# Altium footprint library Capacitors.PcbLib: 95 footprints (part 5 of 6)
Each footprint in its own frame and in the unit in brackets; x right, y up, seen from the top. Pads: shape width x height; smd on the part's side, far side on the other; paste and mask are expansions set on the pad; w line width, h text height; cw(c..) or ccw(c..) is an arc to the next point about the centre after c.
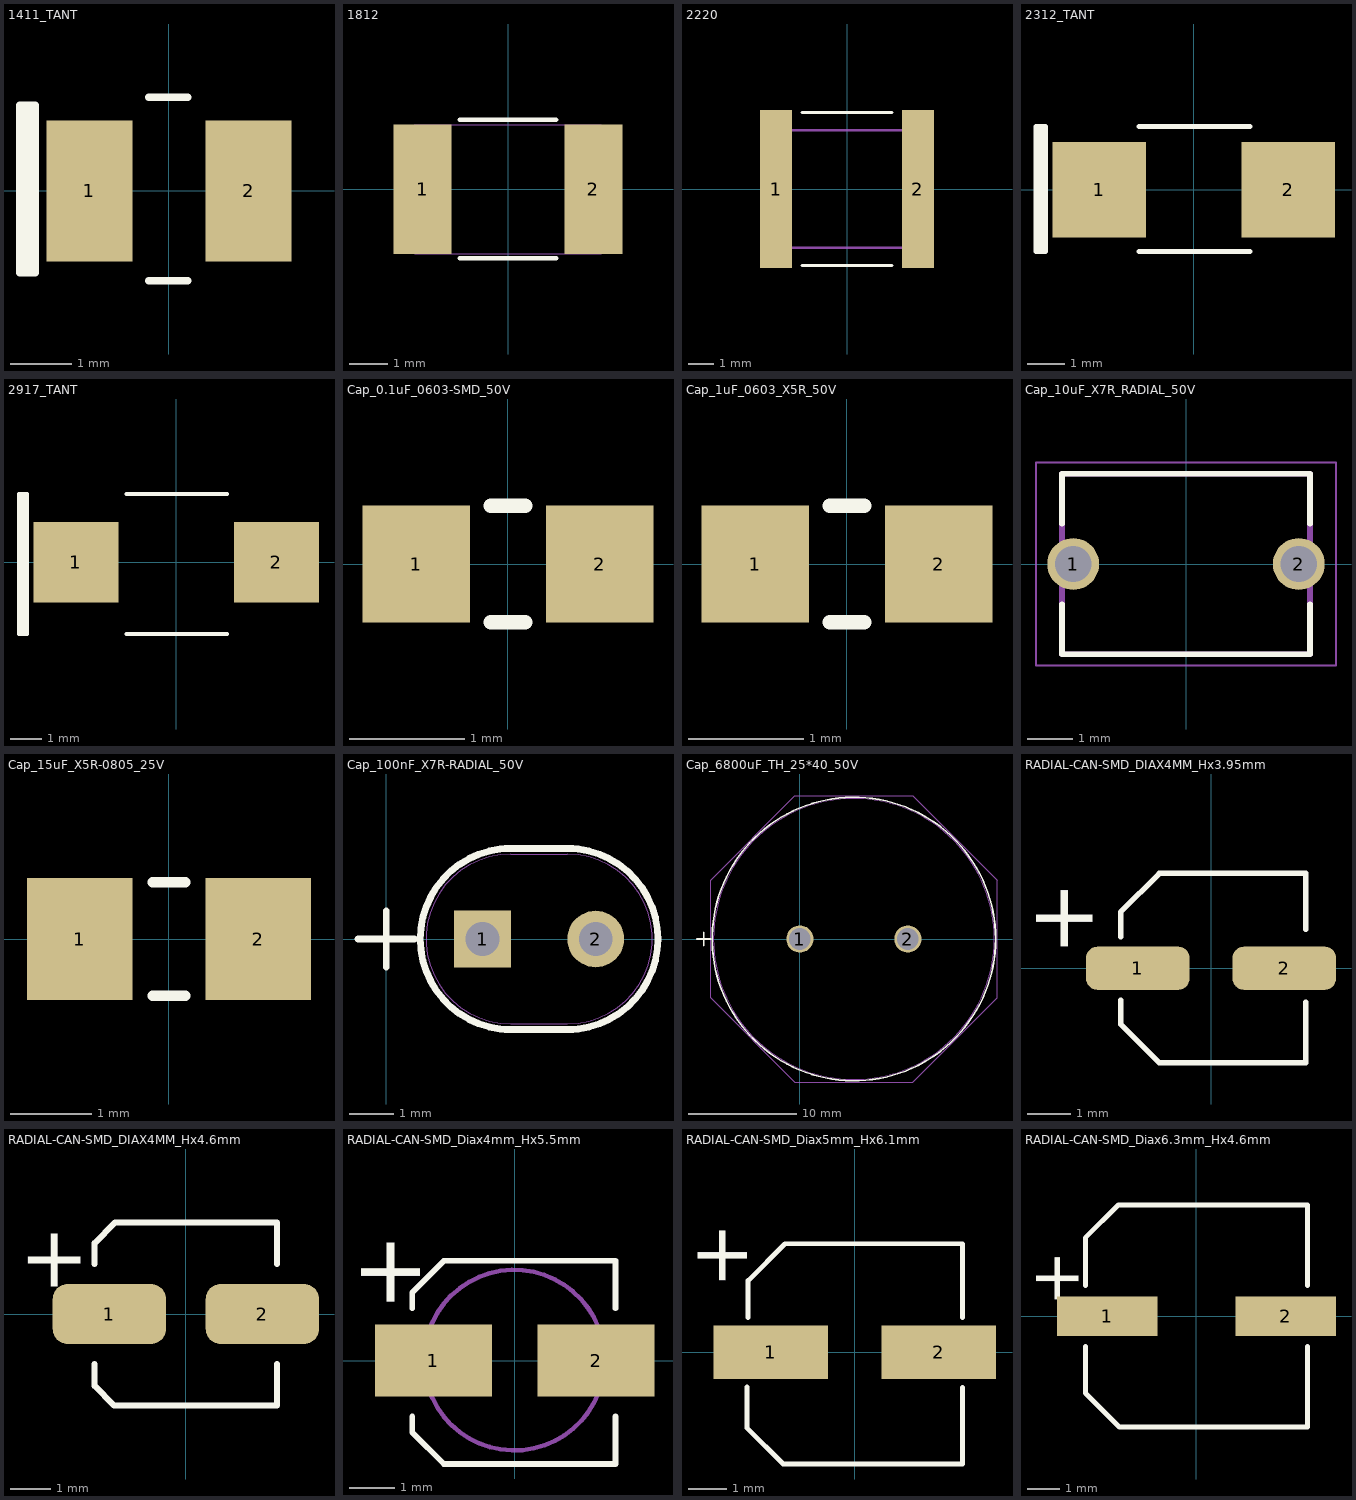
[diagram p4: the footprints below, top view; thin cyan lines are the x and y axes]

## 1411_TANT [mm] "20220701 / E.Naranjo"
pads (2):
  rect 1.405x2.3 smd: 1(-1.3,0) 2(1.3,0)
Top Overlay:
  lines w0.127: -2.31,-1.339 -2.31,1.393 ; -0.332,-1.469 0.303,-1.469 ; -0.332,1.529 0.303,1.529 ; -2.437,-1.339 -2.183,-1.339 -2.183,1.393 -2.437,1.393 -2.437,-1.339
3D body "CTSM_TCM2NK_3528_L3.7W3H2.1T0.13S0.8F2.3A1.9B0.55E2.2G1.8P0.5R1X0.2.step": height 2.12, standoff 0.01, extent -1.836,-1.471 1.864,1.529

## 1812 [mm] "/20220517/F-A.Ospina"
pads (2):
  rect 1.52x3.4 smd paste+0: 1(-2.248,0) 2(2.248,0)
Top Overlay:
  lines w0.127: -1.272,1.829 1.267,1.829 ; -1.27,-1.817 1.27,-1.817
Mechanical 13:
  lines w0.025: -2.451,-1.702 -2.451,1.702 ; -2.451,-1.702 -1.689,-1.702 -1.689,1.702 -2.451,1.702 ; -2.451,-1.702 -2.451,1.702 ; -2.451,-1.702 2.451,-1.702 ; -2.451,1.702 2.451,1.702 ; 2.451,-1.702 1.689,-1.702 1.689,1.702 2.451,1.702 ; 2.451,-1.702 2.451,1.702 ; 2.451,-1.702 2.451,1.702
3D body "CAP_CC1812_YAG.step": height 3.4, standoff 0, extent -2.451,-1.702 2.451,1.702

## 2220 [mm] "5750 Metric / 20190221 / C-A.Serna.A"
height 2.5
pads (2):
  rect 1.25x6.2 smd: 1(-2.775,0) 2(2.775,0)
Top Overlay:
  lines w0.127: -1.75,-3 1.75,-3 ; -1.75,3 1.75,3
Mechanical 1:
  lines w0.1: -3.05,-2.3 3.05,-2.3 3.05,2.3 -3.05,2.3 -3.05,-2.3
3D body: height 2.5, standoff 0, extent -3.05,-2.3 -2.7,2.3
3D body: height 2.5, standoff 0, extent -2.7,-2.3 2.7,2.3
3D body: height 2.5, standoff 0, extent 2.7,-2.3 3.05,2.3

## 2312_TANT [mm] "6032 Metric / 20230427 / J.Jaramillo"
pads (2):
  rect 2.5x2.55 smd: 1(-2.525,0) 2(2.525,0)
Top Overlay:
  lines w0.127: -4.089,-1.655 -4.089,1.69 ; -1.465,-1.655 1.505,-1.655 ; -1.465,1.69 1.505,1.69 ; -4.216,-1.655 -4.216,1.69 -3.962,1.69 -3.962,-1.655 -4.216,-1.655
3D body "2312.step": height 2.7, standoff 0, extent -3.085,-1.655 3.015,1.695

## 2917_TANT [mm] "7343 Metric / 20230427/ J.Jaramillo"
pads (2):
  rect 2.7x2.55 smd: 1(-3.175,0) 2(3.175,0)
Top Overlay:
  lines w0.127: -4.851,-2.285 -4.851,2.165 ; -1.58,-2.285 1.61,-2.285 ; -1.58,2.165 1.61,2.165 ; -4.978,-2.285 -4.978,2.165 -4.724,2.165 -4.724,-2.285 -4.978,-2.285
3D body "2917-3d.step": height 4.2, standoff 0, extent -3.685,-2.285 3.715,2.165

## Cap_0.1uF_0603-SMD_50V [mil] "/20261021/"
pads (2):
  rect 37x40 smd: 1(-31.5,0.01) 2(31.5,0.01)
Top Overlay:
  lines w5: -5.9,-19.99 5.91,-19.99 ; -5.9,19.99 5.91,19.99
3D body "C0603.step": height 11.89, standoff 0, extent -31.49,-15.74 31.5,15.76

## Cap_1uF_0603_X5R_50V [mil] "/20261021/"
pads (2):
  rect 37x40 smd: 1(-31.5,0.01) 2(31.5,0.01)
Top Overlay:
  lines w5: -5.9,-19.99 5.91,-19.99 ; -5.9,19.99 5.91,19.99
3D body "C0603.step": height 11.89, standoff 0, extent -31.49,-15.74 31.5,15.76

## Cap_10uF_X7R_RADIAL_50V [mm] "/20261022/"
pads (2):
  round 1.15 hole 0.8: 1(-2.5,0) 2(2.5,0)
Top Overlay:
  lines w0.127: -2.75,-0.895 -2.75,-2 2.75,-2 2.75,-0.895 ; -2.75,0.895 -2.75,2 2.75,2 2.75,0.895
Mechanical 13:
  lines w0.127: -2.75,-2 2.75,-2 2.75,2 -2.75,2 -2.75,-2
Mechanical 15:
  lines w0.05: -3.325,-2.25 3.325,-2.25 3.325,2.25 -3.325,2.25 -3.325,-2.25
3D body "step_temp.STEP": height 7, standoff -9, extent -2.75,-2 2.75,2

## Cap_15uF_X5R-0805_25V [mm] "/20261021/"
pads (2):
  rect 1.3x1.5 smd: 1(-1.1,0) 2(1.1,0)
Top Overlay:
  lines w0.127: -0.2,-0.7 0.2,-0.7 ; -0.2,0.7 0.2,0.7
3D body: height 1, standoff 0, extent -1.125,-0.7 1.075,0.7

## Cap_100nF_X7R-RADIAL_50V [mil] "/20261102/"
pads (2):
  rect 50x50 / inner round 60 / far side rect 50x50 hole 30 paste-99999 mask-25: 1(85,0)
  round 50 / inner round 60 / far side round 50 hole 30 paste-99999 mask-25: 2(185,0)
Top Overlay:
  lines w6: -25,0 25,0 ; 0,-25 0,25 ; 105,-80 165,-80 ; 105,80 165,80 ; 110,-80 cw(c110,0) 110,80 ; 160,-80 ccw(c160,0) 240,0 ccw(c160,0) 160,80
Mechanical 13:
  lines w0: 110,-75 cw(c110,0) 110,75 ; 160,-75 ccw(c160,0) 160,75
  lines w1: -25,0 25,0 ; 0,-25 0,25 ; 110,-75 160,-75 ; 110,75 160,75
3D body "CAP_C320_KEM.step": height 260, standoff -160, extent 35,-75 235,75

## Cap_6800uF_TH_25*40_50V [mil] "/20261022/"
pads (2):
  round 99 hole 79 paste-99999 mask+0: 1(0,0) 2(393.7,0)
Top Overlay:
  circle w6: c196.85,0 r517
  lines w6: -375.15,0 -325.15,0 ; -350.15,-25 -350.15,25
Mechanical 13:
  circle w1: c196.85,0 r512
  lines w1: -375.15,0 -325.15,0 ; -350.15,-25 -350.15,25
Mechanical 15:
  lines w1: -325.15,-214.94 -325.15,214.94 -18.09,522 411.79,522 718.85,214.94 718.85,-214.94 411.79,-522 -18.09,-522 -325.15,-214.94
3D body "CAP_HX_25X40_RUB.step": height 1654.61, standoff -307.01, extent -315.16,-511.76 710.24,511.76

## RADIAL-CAN-SMD_DIAX4MM_Hx3.95mm [mm] "/20200715/N-A.Potosi"
pads (2):
  rrect50% 2.4x1 smd: 1(-1.7,0) 2(1.7,0)
Top Overlay:
  lines w0.127: -2.1,-0.738 -2.1,-1.3 -1.2,-2.2 2.2,-2.2 2.2,-0.786 ; -2.1,0.727 -2.1,1.3 -1.2,2.2 2.2,2.2 2.2,0.904
  text "+" at -4.064,2.032 h1.52
3D body "PCAP_4x3-ELECT_NCA.step": height 3.25, standoff 0, extent -2.502,-2.248 2.502,2.248

## RADIAL-CAN-SMD_DIAX4MM_Hx4.6mm [mm] "/20200416V-A.Patino"
pads (2):
  rrect50% 2.819x1.5 smd: 1(-1.905,0) 2(1.905,0)
Top Overlay:
  lines w0.152: -2.273,-1.247 -2.273,-1.791 -1.791,-2.273 2.273,-2.273 2.273,-1.247 ; -2.273,1.247 -2.273,1.765 -1.765,2.273 2.273,2.273 2.273,1.247
  text "+" at -4.153,0.675 h1.52
3D body "CAP_UZP_4X4P5-M.step": height 4.65, standoff 0, extent -2.541,-2.159 2.667,2.133

## RADIAL-CAN-SMD_Diax4mm_Hx5.5mm [mm] "20191118 / J-P.Vargas.A"
pads (2):
  rect 2.6x1.6 smd: 1(-1.8,0) 2(1.8,0)
Top Overlay:
  lines w0.127: -2.27,-1.24 -2.27,-1.59 -1.57,-2.29 2.23,-2.29 2.23,-1.24 ; -2.27,1.16 -2.27,1.51 -1.57,2.21 2.23,2.21 2.23,1.16
  text "+" at -3.4,2.83 h1.52
Mechanical 1:
  circle w0.1: c-0.01,0.01 r2
3D body "865090640005.step": height 5.21, standoff -0.29, extent -2.503,-2.15 2.504,2.15

## RADIAL-CAN-SMD_Diax5mm_Hx6.1mm [mm] "20190618 / M.X-Arias"
pads (2):
  rect 3x1.4 smd: 1(-2.2,0) 2(2.2,0)
Top Overlay:
  lines w0.127: -2.819,-0.9 -2.819,-1.981 -1.88,-2.921 2.819,-2.921 2.819,-0.91 ; -2.794,0.91 -2.794,1.88 -1.829,2.845 2.819,2.845 2.819,0.91
  text "+" at -4.11,3.41 h1.52
3D body "CAP_SMD_radial.stp": height 6.15, standoff 0, extent -3.241,-2.726 3.261,2.786

## RADIAL-CAN-SMD_Diax6.3mm_Hx4.6mm [mil] "20200923/ V-A.Patino"
pads (2):
  rect 122x48 smd: 1(-108.5,0) 2(108.5,0)
Top Overlay:
  lines w6: -135,-37.1 -135,-93.5 -93.5,-135 135,-135 135,-37.1 ; -135,37.1 -135,95.04 -95.04,135 135,135 135,37.1
  text "+" at -195,80 h60
3D body "CAP_UZP_6P3X4P5_NCH.step": height 183.11, standoff 0, extent -149.48,-130 149.49,130
3D body: height 10, standoff 0, extent 0,0 10,10